# Altium footprint library TO.PcbLib: 38 footprints (part 1 of 3)
Each footprint in its own frame and in the unit in brackets; x right, y up, seen from the top. Pads: shape width x height; smd on the part's side, far side on the other; paste and mask are expansions set on the pad; w line width, h text height; cw(c..) or ccw(c..) is an arc to the next point about the centre after c.
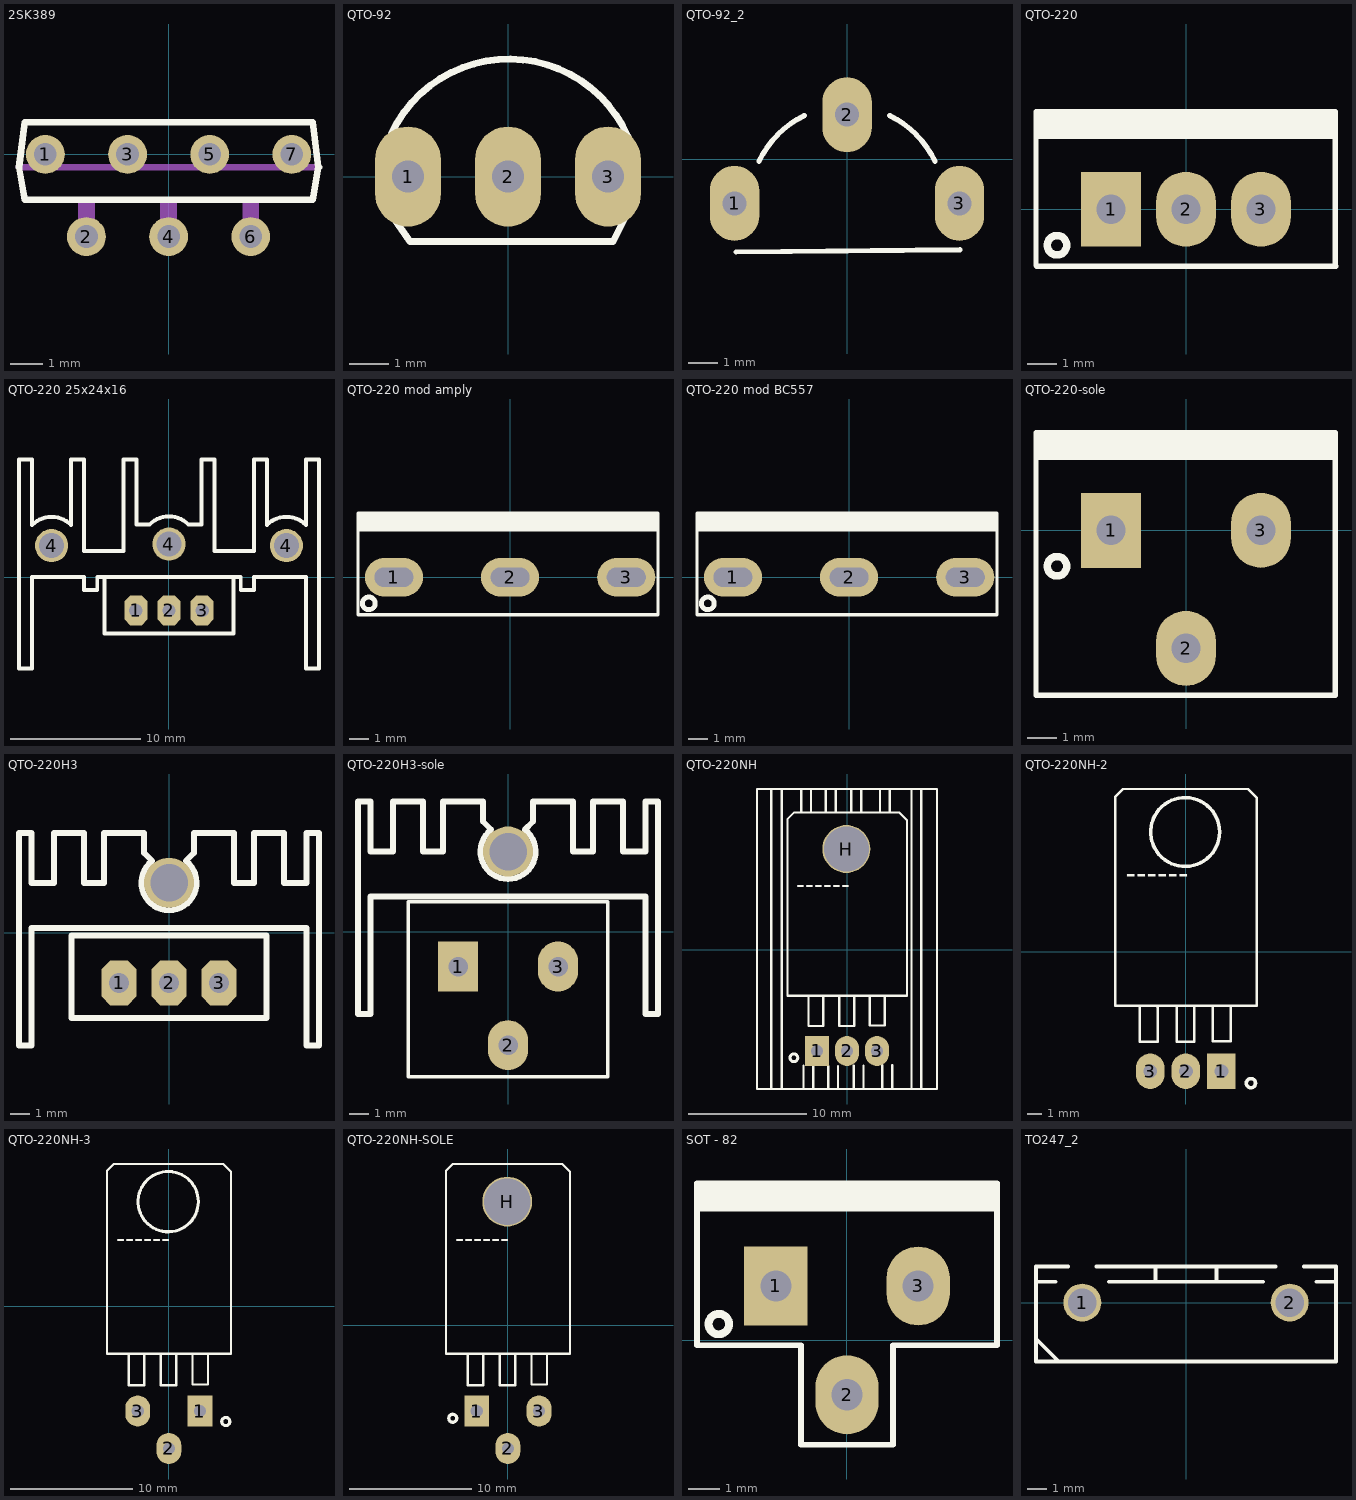
[diagram p0: the footprints below, top view; thin cyan lines are the x and y axes]

## 2SK389 [mm]
pads (7):
  round 1.2 hole 0.7: 1(-3.81,0) 2(-2.54,-2.54) 3(-1.27,0) 4(0,-2.54) 5(1.27,0) 6(2.54,-2.54) 7(3.81,0)
Top Overlay:
  lines w0.203: 4.65,-0.4 4.625,-0.4 ; 4.625,-0.4 4.45,-1.4 -4.45,-1.4 -4.625,-0.4 -4.45,1 4.45,1 4.625,-0.4
Mechanical 13:
  region: -2.286,-2.667 -2.794,-2.667 -2.794,-1.397 -2.286,-1.397
  region: 0.254,-2.67 -0.254,-2.67 -0.254,-1.397 0.254,-1.397
  region: 2.794,-2.672 2.29,-2.672 2.29,-1.397 2.794,-1.397
  lines w0.203: -4.625,-0.4 4.625,-0.4

## QTO-92 [mil] "TO-92"
height 200
pads (3):
  oval 66x100 hole 32: 1(-100,0) 2(0,0) 3(100,0)
Top Overlay:
  lines w7: -116.52,43.21 cw(c0.97,-12.43) 119.94,39.97 ; -115.34,-40.24 -98,-65 105,-65 118,-39
3D body "SW3dPS-TO92.STEP": height 245.04, standoff -199.79, extent -108.87,-65.56 108.87,95.39

## QTO-92_2 [mil] "TO-92"
height 200
pads (3):
  oval 66x100 hole 32: 1(-150,-59.06) 2(0,59.06) 3(150,-59.06)
Top Overlay:
  lines w7: -148,-124.06 150.79,-121.06 ; -117.49,-3.42 cw(c0,-59.06) -56.57,57.99 ; 56.57,57.99 cw(c0,-59.06) 117.49,-3.42
3D body "SW3dPS-TO92.STEP": height 245.04, standoff -199.79, extent -108.87,-120.08 108.87,40.87

## QTO-220 [mil] "TO-220 - 1-2-3"
height 200
pads (3):
  rect 80x100 hole 39: 1(-100,0)
  oval 80x100 hole 39: 2(0,0) 3(100,0)
Top Overlay:
  circle w10: c-172.03,-48 r12.97
  rectangle: -199,94 200,130
  lines w7: 198,107 199,93 ; -200,-75 -200,130 199,130 199,-75 200,-76 -176,-76 -199,-76 -200,-75
3D body "IC_ON_Semiconductor_LM7812CT_eec.STEP": height 803.15, standoff -157.48, extent -199.5,-63.25 200.5,108.13

## QTO-220 25x24x16 [mil] "TO-220 25x24x16"
pads (6):
  oct 70x90 hole 40: 1(-100,-100) 2(0,-100) 3(100,-100)
  round 100 hole 75: 4(-354.33,95.47) 4(0,100) 4(354.33,95.47)
Top Overlay:
  lines w12: -413.39,157.48 -413.39,354.96 -452.76,354.96 -452.76,-274.96 -413.39,-274.96 -413.39,0.63 -255.91,0.63 -255.91,-38.74 -216.54,-38.74 -216.54,0.63 216.54,0.63 216.54,-38.74 255.91,-38.74 255.91,0.63 413.39,0.63 413.39,-274.96 452.76,-274.96 452.76,354.96 413.39,354.96 413.39,158.11 ; -295.27,158.11 -295.28,354.96 -255.91,354.96 -255.91,79.37 -137.8,79.37 -137.8,354.96 -98.43,354.96 -98.43,159.06 -59.06,159.06 ; -195,0.63 -195,-170 195,-170 195,-5 ; 59.06,159.06 98.43,159.06 98.43,354.96 137.8,354.96 137.8,79.37 255.91,79.37 255.91,354.96 295.28,354.96 295.27,158.11
  lines w12.01: -413.39,157.48 cw(c-354.33,98.42) -295.27,157.48 ; -59.06,159.06 cw(c0,100) 59.06,159.06 ; 295.27,158.11 cw(c354.33,99.05) 413.39,158.11
3D body "User Library-TO-220-1.STEP": height 215.75, standoff -917.32, extent -196.88,-176.17 192.88,1
3D body "Tannhiet25x16.STEP": height 984.25, standoff -157.48, extent -452.76,-274.96 452.76,354.96

## QTO-220 mod amply [mm] "TO-220 - 1-2-3"
height 5.08
pads (3):
  oval 3x2 hole 1 slot 2 at 0 deg: 1(-6,0) 2(0,0) 3(6,0)
Top Overlay:
  circle w0.254: c-7.295,-1.346 r0.329
  rectangle: -7.829,2.362 7.64,3.277
  lines w0.178: -7.854,-1.93 -7.854,3.302 7.64,3.302 7.64,-1.93 -7.854,-1.93
3D body "SW3dPS-TO220AB.STEP": height 19.17, standoff -10.16, extent -5.478,-1.583 5.735,3.107

## QTO-220 mod BC557 [mm] "TO-220 - 1-2-3"
height 5.08
pads (3):
  oval 3x2 hole 1 slot 2 at 0 deg: 1(-6,0) 2(0,0) 3(6,0)
Top Overlay:
  circle w0.254: c-7.295,-1.346 r0.329
  rectangle: -7.829,2.362 7.64,3.277
  lines w0.178: -7.854,-1.93 7.64,-1.93 7.64,3.302 -7.854,3.302 -7.854,-1.93
3D body "TO-247.stp": height 23.3, standoff -10.75, extent -7.781,-2.489 7.669,2.371

## QTO-220-sole [mil] "TO-220 - 1-2-3"
height 200
pads (3):
  rect 80x100 hole 39: 1(-100,0)
  oval 80x100 hole 39: 2(0,-157.48) 3(100,0)
Top Overlay:
  circle w10: c-172.03,-48 r12.97
  rectangle: -199,94 200,130
  lines w7: 198,107 199,93 ; -200,-220 199,-220 199,130 -200,130 -200,-75 -200,-220
3D body "IC_ON_Semiconductor_LM7812CT_eec.STEP": height 803.15, standoff -157.48, extent -199.5,-63.25 200.5,108.13

## QTO-220H3 [mil] "TO-220 1-2-3"
pads (4):
  oct 70x90 hole 40: 1(-100,-100) 2(0,-100) 3(100,-100)
  round 100 hole 75: ""(0,100)
Top Overlay:
  lines w12: -34,144 -50,160 -50,200 -130,200 -130,100 -170,100 -170,200 -230,200 -230,100 -275,100 -275,200 -300,200 -300,-225 -275,-225 -275,10 275,10 275,-225 300,-225 300,200 275,200 275,100 230,100 230,200 170,200 170,100 130,100 130,200 50,200 50,160 33.59,143.59 ; -33.63,143.52 ccw(c0,100) 33.77,143.41 ; -195,-170 195,-170 195,-5 -195,-5 -195,-170
3D body "User Library-TO-220-1.STEP": height 322.83, standoff -810.24, extent -196.88,-176.17 192.88,1
3D body "SW3dPS-heatsink TO126.STEP": height 984.25, standoff -149.61, extent -289.97,-202.25 291.97,223

## QTO-220H3-sole [mil] "TO-220 1-2-3"
pads (4):
  rect 80x100 hole 39: 1(-100,-70)
  oval 80x100 hole 39: 2(0,-227.48) 3(100,-70)
  round 100 hole 75: ""(0,160)
Top Overlay:
  lines w7: -200,-290 -200,-145 -200,60 199,60 199,-290 -200,-290
  lines w12: -34,204 -50,220 -50,260 -130,260 -130,160 -170,160 -170,260 -230,260 -230,160 -275,160 -275,260 -300,260 -300,-165 -275,-165 -275,70 275,70 275,-165 300,-165 300,260 275,260 275,160 230,160 230,260 170,260 170,160 130,160 130,260 50,260 50,220 33.59,203.59 ; -33.63,203.52 ccw(c0,160) 33.77,203.41
3D body "SW3dPS-heatsink TO126.STEP": height 994.25, standoff -139.61, extent -289.97,-142.25 291.97,283
3D body "User Library-TO-220-1.STEP": height 322.83, standoff -810.24, extent -194.88,-150 194.88,27.17

## QTO-220NH [mil] "TO-220 - 1-2-3"
height 200
pads (4):
  rect 80x100 hole 39: 1(-100,-336.5)
  oval 80x100 hole 39: 2(0,-336.5) 3(100,-336.5)
  round 160 hole 150: H(-2,336.5)
Top Overlay:
  circle w10: c-177.03,-359.5 r12.97
  lines w7: -199,212.5 -199,435.5 -177,457.5 175,457.5 200,432.5 200,393.5 ; -199,215.5 -199,-152.5 200,-152.5 200,216.5 ; -129,-158.5 -129,-253.5 -79,-253.5 -79,-156.5 -80,-155.5 ; -26,-158.5 -26,-253.5 24,-253.5 24,-156.5 23,-155.5 ; 76,-156.5 76,-251.5 126,-251.5 126,-154.5 125,-153.5 ; 200,215.5 200,396.5
  lines w8: -252,-463.5 -252,536.5 ; -217,-463.5 -217,536.5 ; -153,459.5 -153.01,533.47 ; -145,-460.5 -145.01,-386.53 ; -120,459.5 -120.01,533.47 ; -112,-460.5 -112.01,-386.53 ; -71,458.5 -71.01,532.47 ; -63,-461.5 -63.01,-387.53 ; -38,458.5 -38.01,532.47 ; -30,-461.5 -30.01,-387.53 ; 14,459.5 13.99,533.47 ; 22,-460.5 21.99,-386.53 ; 47,459.5 46.99,533.47 ; 55,-460.5 54.99,-386.53 ; 110,461.5 109.99,535.47 ; 118,-458.5 117.99,-384.53 ; 143,461.5 142.99,535.47 ; 151,-458.5 150.99,-384.53 ; 215,-463.5 215,536.5 ; 248,-463.5 248,536.5 ; -300,-463.5 -300,536.5 300,536.5 300,-463.5 -300,-463.5
  text "------" at -169,190.5 h60
3D body "SW3DPS-TO-220-DEFAULT.STEP": height 165.35, standoff -118.11, extent -200,-340.16 200,427.16

## QTO-220NH-2 [mil] "TO-220 - 1-2-3"
height 200
pads (3):
  rect 80x100 hole 39: 1(100,-336.5)
  oval 80x100 hole 39: 2(0,-336.5) 3(-100,-336.5)
Top Overlay:
  circle w10: c-2,336.5 r96.89
  circle w10: c183.07,-370.08 r12.97
  lines w7: -199,212.5 -199,435.5 -177,457.5 175,457.5 200,432.5 200,393.5 ; -199,215.5 -199,-152.5 200,-152.5 200,216.5 ; -129,-158.5 -129,-253.5 -79,-253.5 -79,-156.5 -80,-155.5 ; -26,-158.5 -26,-253.5 24,-253.5 24,-156.5 23,-155.5 ; 76,-156.5 76,-251.5 126,-251.5 126,-154.5 125,-153.5 ; 200,215.5 200,396.5
  text "------" at -169,190.5 h60
3D body "TO-220_horizontal_back_line.stp": height 196.85, standoff -196.85, extent -205.71,-349.41 207.68,447.83

## QTO-220NH-3 [mil] "TO-220 - 1-2-3"
height 200
pads (3):
  rect 80x100 hole 39: 1(100,-336.5)
  oval 80x100 hole 39: 2(0,-456.5) 3(-100,-336.5)
Top Overlay:
  circle w10: c183.07,-370.08 r12.97
  circle w10: c-2,336.5 r96.89
  lines w7: -199,212.5 -199,435.5 -177,457.5 175,457.5 200,432.5 200,393.5 ; -199,215.5 -199,-152.5 200,-152.5 200,216.5 ; -129,-158.5 -129,-253.5 -79,-253.5 -79,-156.5 -80,-155.5 ; -26,-158.5 -26,-253.5 24,-253.5 24,-156.5 23,-155.5 ; 76,-156.5 76,-251.5 126,-251.5 126,-154.5 125,-153.5 ; 200,215.5 200,396.5
  text "------" at -169,190.5 h60
3D body "TO-220_horizontal_back_line.stp": height 196.85, standoff -196.85, extent -205.71,-349.41 207.68,447.83

## QTO-220NH-SOLE [mil] "TO-220 - 1-2-3"
height 200
pads (4):
  rect 80x100 hole 39: 1(-100,-276.5)
  oval 80x100 hole 39: 2(0,-396.5) 3(100,-276.5)
  round 160 hole 150: H(-2,396.5)
Top Overlay:
  circle w10: c-177.03,-299.5 r12.97
  lines w7: -199,272.5 -199,495.5 -177,517.5 175,517.5 200,492.5 200,453.5 ; -199,275.5 -199,-92.5 200,-92.5 200,276.5 ; -129,-98.5 -129,-193.5 -79,-193.5 -79,-96.5 -80,-95.5 ; -26,-98.5 -26,-193.5 24,-193.5 24,-96.5 23,-95.5 ; 76,-96.5 76,-191.5 126,-191.5 126,-94.5 125,-93.5 ; 200,275.5 200,456.5
  text "------" at -169,250.5 h60
3D body "SW3DPS-TO-220-DEFAULT.STEP": height 165.35, standoff -118.11, extent -200,-280.16 200,487.16

## SOT - 82 [mm] "SOT - 82 - 1-2-3"
height 5.08
pads (3):
  rect 2.032x2.54 hole 1: 1(-2.29,1.75)
  oval 2.032x2.54 hole 1: 2(0,-1.75) 3(2.29,1.75)
Top Overlay:
  circle w0.254: c-4.125,0.525 r0.329
  rectangle: -4.825,4.138 4.825,5.052
  lines w0.178: -4.825,-0.155 -1.48,-0.155 -1.48,-3.355 1.48,-3.355 1.48,-0.155 4.825,-0.155 4.825,5.052 -4.825,5.052 -4.825,-0.155
3D body "SOT-82 h05.stp": height 16.1, standoff -3, extent -3.875,0.775 3.925,3.575

## TO247_2 [mm]
height 2
pads (2):
  round 2 / inner round 2 / far side oval 2.4x3.6 hole 1.5: 1(-5.461,0) 2(5.461,0)
Top Overlay:
  lines w0.2: -7.9,-1.9 -6.7,-3.1 ; -7.9,1.1 -6.861,1.1 ; -6.211,1.9 -7.9,1.9 -7.9,-3.1 7.9,-3.1 7.9,1.9 6.211,1.9 ; -4.711,1.9 4.711,1.9 ; -4.061,1.1 4.061,1.1 ; -1.6,1.1 -1.6,1.9 ; 1.6,1.1 1.6,1.9 ; 6.861,1.1 7.9,1.1
Top Assembly (Mech9):
  text ".Designator" at -3.65,-0.338 h1.5
3D body "TO-3P-3LD_2PIN.STEP": height 23.92, standoff -3.48, extent -7.8,-3 7.8,1.809